# Altium footprint library Inductors.PcbLib: 7 footprints
Each footprint in its own frame and in the unit in brackets; x right, y up, seen from the top. Pads: shape width x height; smd on the part's side, far side on the other; paste and mask are expansions set on the pad; w line width, h text height; cw(c..) or ccw(c..) is an arc to the next point about the centre after c.
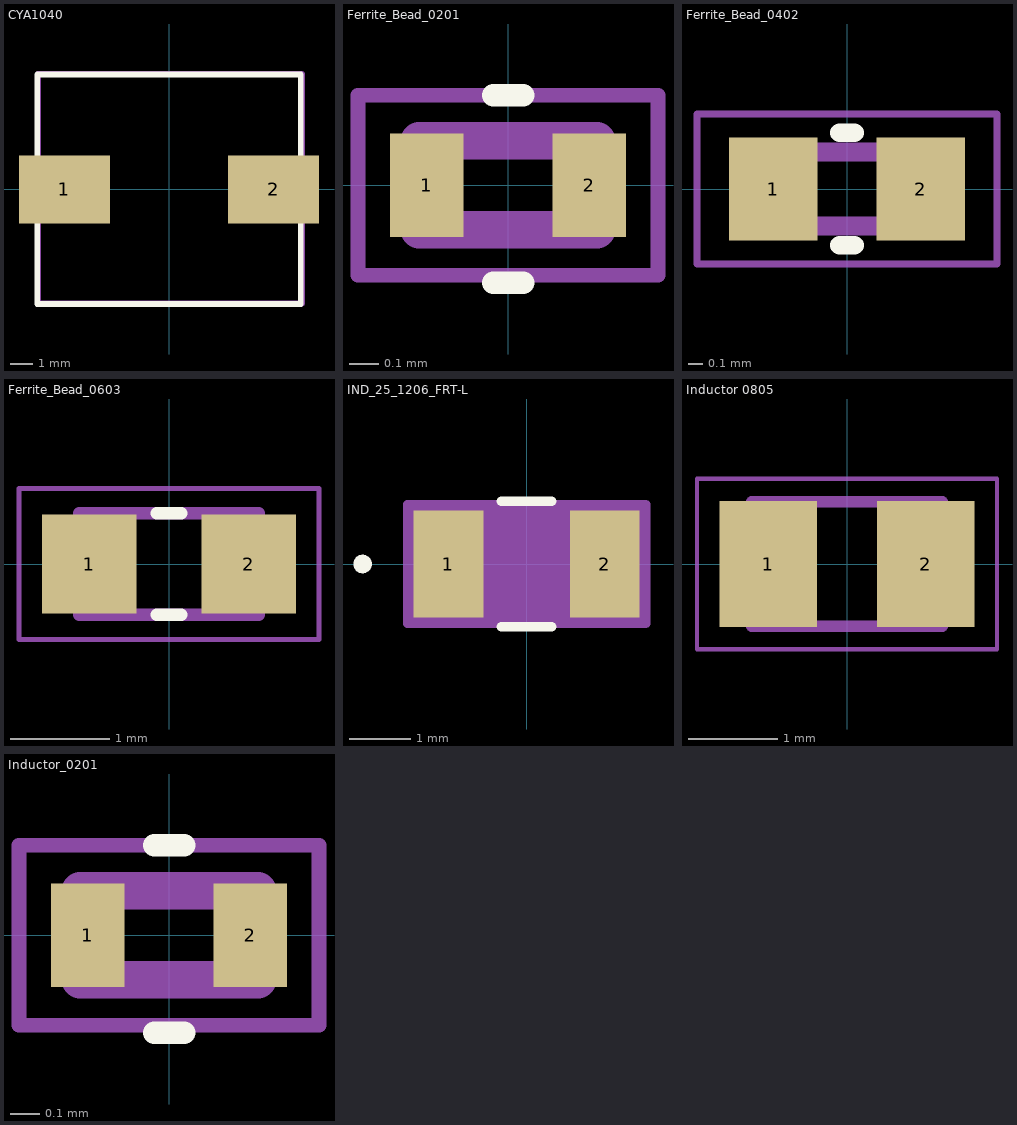
[diagram p0: the footprints below, top view; thin cyan lines are the x and y axes]

## CYA1040 [mm]
pads (2):
  rect 4x3 smd: 1(-4.6,0) 2(4.6,0)
Top Overlay:
  lines w0.254: -5.8,-5.05 5.8,-5.05 5.8,5.05 -5.8,5.05 -5.8,-5.05
Top Component Outline:
  lines w0.254: -5.748,-5.019 5.852,-5.019 5.852,5.081 -5.748,5.081 -5.748,-5.019
3D body "CYA1040.STEP": height 4, standoff 0, extent -5.758,-5.02 5.842,5.08

## Ferrite_Bead_0201 [mm]
pads (2):
  rect 0.25x0.35 smd mask+0.025: 1(-0.275,0) 2(0.275,0)
Top Overlay:
  lines w0.076: -0.051,-0.33 0.051,-0.33 ; -0.051,0.305 0.051,0.305
Mechanical 13:
  lines w0.127: -0.3,-0.15 0.3,-0.15 0.3,0.15 -0.3,0.15 -0.3,-0.15
Mechanical 15:
  lines w0.05: -0.508,-0.305 0.508,-0.305 0.508,0.305 -0.508,0.305 -0.508,-0.305
3D body "WE-TMSB-0201.stp": height 0.3, standoff 0, extent -0.3,-0.15 0.3,0.15

## Ferrite_Bead_0402 [mm]
pads (2):
  rect 0.6x0.7 smd mask+0.025: 1(-0.5,0) 2(0.5,0)
Top Overlay:
  lines w0.127: -0.051,-0.381 0.051,-0.381 ; -0.051,0.381 0.051,0.381
Mechanical 13:
  lines w0.127: -0.5,-0.25 0.5,-0.25 0.5,0.25 -0.5,0.25 -0.5,-0.25
Mechanical 15:
  lines w0.05: -1.016,-0.508 1.016,-0.508 1.016,0.508 -1.016,0.508 -1.016,-0.508
3D body "MPZ1005S100CT000.step": height 0.5, standoff 0, extent -0.5,-0.254 0.5,0.296

## Ferrite_Bead_0603 [mm]
pads (2):
  rect 0.95x1 smd mask+0.025: 1(-0.8,0) 2(0.8,0)
Top Overlay:
  lines w0.127: -0.12,-0.51 0.12,-0.51 ; -0.12,0.51 0.12,0.51
Mechanical 13:
  lines w0.127: -0.9,-0.51 0.9,-0.51 0.9,0.51 -0.9,0.51 -0.9,-0.51
Mechanical 15:
  lines w0.05: -1.508,-0.761 1.508,-0.761 1.508,0.761 -1.508,0.761 -1.508,-0.761
3D body "BLM18KG121TN1D.step": height 0.75, standoff 0, extent -0.8,-0.4 0.8,0.4

## IND_25_1206_FRT-L [mil]
pads (2):
  rect 45x69 smd paste+0 mask+1: 1(-50.5,0) 2(50.5,0)
Top Overlay:
  circle w6: c-106,0 r3
  lines w6: -16.35,-40.5 16.35,-40.5 ; -16.35,40.5 16.35,40.5
Mechanical 13:
  circle w0: c-45.5,0 r3
  lines w1: -67,-35.5 -67,35.5 ; -67,-35.5 -28,-35.5 -28,35.5 -67,35.5 ; -67,-35.5 67,-35.5 ; -67,-35.5 -67,35.5 ; -67,35.5 67,35.5 ; 67,-35.5 28,-35.5 28,35.5 67,35.5 ; 67,-35.5 67,35.5 ; 67,-35.5 67,35.5
Mechanical 15:
  region: 77,-38.5 -77,-38.5 -77,38.5 77,38.5
  lines w6: -77,-38.5 -77,38.5 77,38.5 77,-38.5 -77,-38.5
3D body "IND_25_1206_FRT.step": height 50.98, standoff 0, extent -67.01,-35.51 67.01,35.51

## Inductor 0805 [mm]
pads (2):
  rect 1.1x1.42 smd mask+0.051: 1(-0.885,0) 2(0.885,0)
Mechanical 13:
  lines w0.127: -1.07,-0.7 -1.07,0.7 1.07,0.7 1.07,-0.7 -1.07,-0.7
Mechanical 15:
  lines w0.05: -1.685,-0.96 -1.685,0.96 1.685,0.96 1.685,-0.96 -1.685,-0.96
3D body "LQM21PN3R3MGRD.step": height 1, standoff 0, extent -1,-0.625 1,0.625

## Inductor_0201 [mm]
pads (2):
  rect 0.25x0.35 smd mask+0.025: 1(-0.275,0) 2(0.275,0)
Top Overlay:
  lines w0.076: -0.051,-0.33 0.051,-0.33 ; -0.051,0.305 0.051,0.305
Mechanical 13:
  lines w0.127: -0.3,-0.15 -0.3,0.15 0.3,0.15 0.3,-0.15 -0.3,-0.15
Mechanical 15:
  lines w0.05: -0.508,-0.305 -0.508,0.305 0.508,0.305 0.508,-0.305 -0.508,-0.305
3D body "WE-TMSB-0201.stp": height 0.3, standoff 0, extent -0.3,-0.15 0.3,0.15